# Altium footprint library WE-HCFT.PcbLib: 57 footprints (part 4 of 4)
Each footprint in its own frame and in the unit in brackets; x right, y up, seen from the top. Pads: shape width x height; smd on the part's side, far side on the other; paste and mask are expansions set on the pad; w line width, h text height; cw(c..) or ccw(c..) is an arc to the next point about the centre after c.
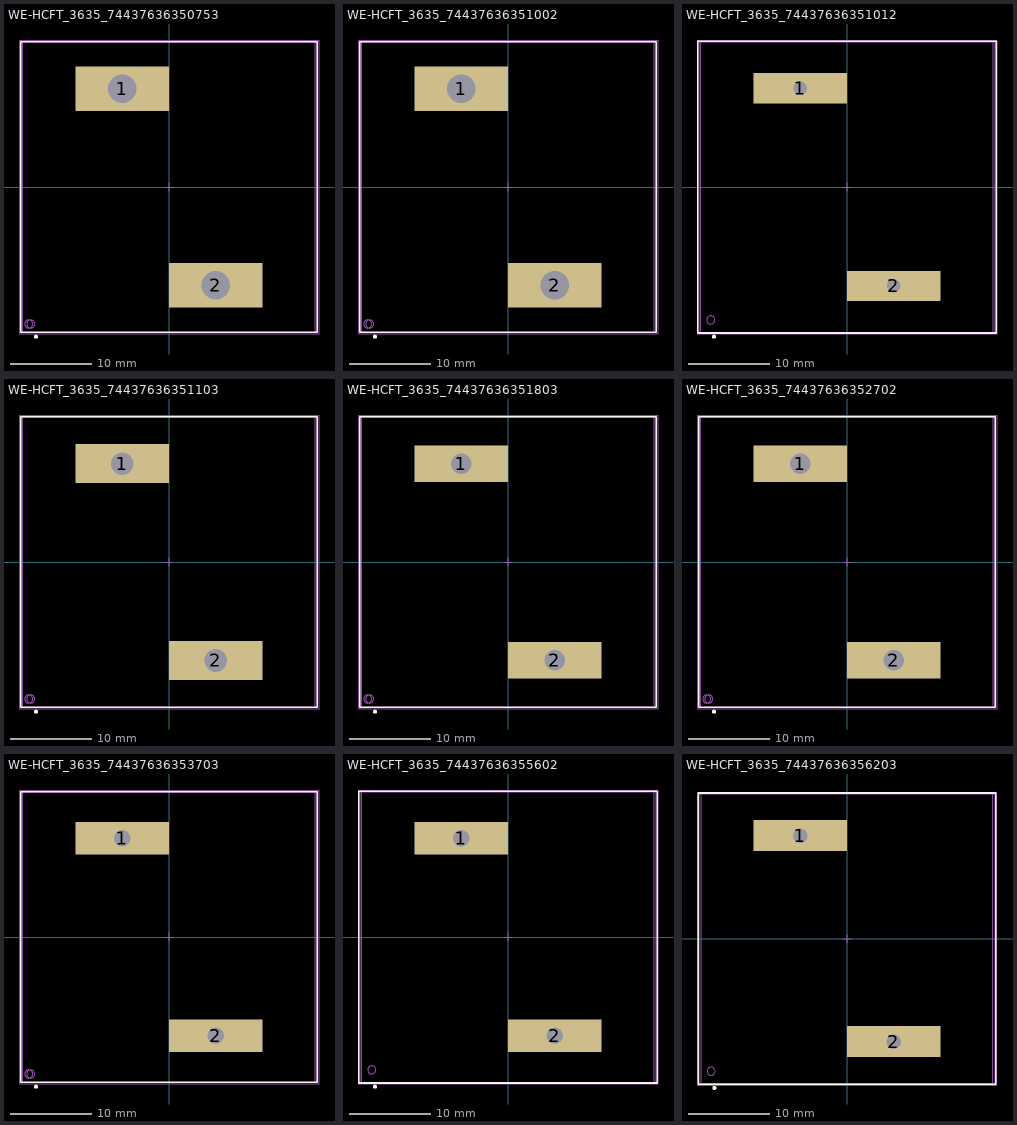
[diagram p3: the footprints below, top view; thin cyan lines are the x and y axes]

## WE-HCFT_3635_74437636350753 [mm] "THT High Current Inductor, body 36.00 x 35.70 mm"
height 34.2
pads (2):
  rect 11.5x5.5 hole 3.5 square: 1(-5.75,12.1) 2(5.75,-12.1)
Top Overlay:
  circle w0.25: c-16.364,-18.413 r0.125
  lines w0.2: -18.25,-17.85 18.25,-17.85 18.25,17.85 -18.25,17.85 -18.25,-17.85
Top Assembly:
  circle w0.1: c-17.25,-16.85 r0.5
  lines w0.1: -18.25,-17.85 18.25,-17.85 18.25,17.85 -18.25,17.85 -18.25,-17.85
Top Designator:
  text ".Designator" at -3.647,-0.357 h1
Top 3D Body:
  circle w0.1: c-17,-16.85 r0.5
  lines w0.1: -18,-17.85 -18,17.85 18,17.85 18,-17.85 -18,-17.85
Top Courtyard:
  lines w0.05: -18.45,-18.05 -18.45,18.05 18.45,18.05 18.45,-18.05 -18.45,-18.05
Top Component Center:
  lines w0.1: -0.5,0 0.5,0 ; 0,-0.5 0,0.5
3D body "74437636350753.stp": height 33.25, standoff -3.95, extent -18,-17.6 18,17.6

## WE-HCFT_3635_74437636351002 [mm] "THT High Current Inductor, body 36.00 x 35.70 mm"
height 34.2
pads (2):
  rect 11.5x5.5 hole 3.5 square: 1(-5.75,12.1) 2(5.75,-12.1)
Top Overlay:
  circle w0.25: c-16.364,-18.413 r0.125
  lines w0.2: -18.25,-17.85 18.25,-17.85 18.25,17.85 -18.25,17.85 -18.25,-17.85
Top Assembly:
  circle w0.1: c-17.25,-16.85 r0.5
  lines w0.1: -18.25,-17.85 18.25,-17.85 18.25,17.85 -18.25,17.85 -18.25,-17.85
Top Designator:
  text ".Designator" at -3.647,-0.357 h1
Top 3D Body:
  circle w0.1: c-17,-16.85 r0.5
  lines w0.1: -18,-17.85 -18,17.85 18,17.85 18,-17.85 -18,-17.85
Top Courtyard:
  lines w0.05: -18.45,-18.05 -18.45,18.05 18.45,18.05 18.45,-18.05 -18.45,-18.05
Top Component Center:
  lines w0.1: -0.5,0 0.5,0 ; 0,-0.5 0,0.5
3D body "74437636351002.stp": height 33.25, standoff -3.95, extent -18,-17.6 18,17.6

## WE-HCFT_3635_74437636351012 [mm] "THT High Current Inductor, body 36.00 x 35.70 mm"
height 34.2
pads (2):
  rect 11.5x3.7 hole 1.7 square: 1(-5.75,12.15) 2(5.75,-12.15)
Top Overlay:
  circle w0.25: c-16.364,-18.413 r0.125
  lines w0.2: -18.35,-17.95 18.35,-17.95 18.35,17.95 -18.35,17.95 -18.35,-17.95
Top Assembly:
  circle w0.1: c-16.75,-16.35 r0.5
  lines w0.1: -18.25,-17.85 18.25,-17.85 18.25,17.85 -18.25,17.85 -18.25,-17.85
Top Designator:
  text ".Designator" at -3.647,-0.357 h1
Top 3D Body:
  lines w0.1: -18,-17.85 -18,17.85 18,17.85 18,-17.85 -18,-17.85
Top Courtyard:
  lines w0.05: -18.45,-18.05 -18.45,18.05 18.45,18.05 18.45,-18.05 -18.45,-18.05
Top Component Center:
  lines w0.1: -0.5,0 0.5,0 ; 0,-0.5 0,0.5
3D body "74437636351012.stp": height 33.25, standoff -3.95, extent -18,-17.6 18,17.6

## WE-HCFT_3635_74437636351103 [mm] "THT High Current Inductor, body 36.00 x 35.70 mm"
height 34.2
pads (2):
  rect 11.5x4.8 hole 2.8 square: 1(-5.75,12.1) 2(5.75,-12.1)
Top Overlay:
  circle w0.25: c-16.364,-18.413 r0.125
  lines w0.2: -18.25,-17.85 18.25,-17.85 18.25,17.85 -18.25,17.85 -18.25,-17.85
Top Assembly:
  circle w0.1: c-17.25,-16.85 r0.5
  lines w0.1: -18.25,-17.85 18.25,-17.85 18.25,17.85 -18.25,17.85 -18.25,-17.85
Top Designator:
  text ".Designator" at -3.647,-0.357 h1
Top 3D Body:
  circle w0.1: c-17,-16.85 r0.5
  lines w0.1: -18,-17.85 -18,17.85 18,17.85 18,-17.85 -18,-17.85
Top Courtyard:
  lines w0.05: -18.45,-18.05 -18.45,18.05 18.45,18.05 18.45,-18.05 -18.45,-18.05
Top Component Center:
  lines w0.1: -0.5,0 0.5,0 ; 0,-0.5 0,0.5
3D body "74437636351103.stp": height 33.25, standoff -3.95, extent -18,-17.6 18,17.6

## WE-HCFT_3635_74437636351803 [mm] "THT High Current Inductor, body 36.00 x 35.70 mm"
height 34.2
pads (2):
  rect 11.5x4.5 hole 2.5 square: 1(-5.75,12.1) 2(5.75,-12.1)
Top Overlay:
  circle w0.25: c-16.364,-18.413 r0.125
  lines w0.2: -18.25,-17.85 18.25,-17.85 18.25,17.85 -18.25,17.85 -18.25,-17.85
Top Assembly:
  circle w0.1: c-17.25,-16.85 r0.5
  lines w0.1: -18.25,-17.85 18.25,-17.85 18.25,17.85 -18.25,17.85 -18.25,-17.85
Top Designator:
  text ".Designator" at -3.647,-0.357 h1
Top 3D Body:
  circle w0.1: c-17,-16.85 r0.5
  lines w0.1: -18,-17.85 -18,17.85 18,17.85 18,-17.85 -18,-17.85
Top Courtyard:
  lines w0.05: -18.45,-18.05 -18.45,18.05 18.45,18.05 18.45,-18.05 -18.45,-18.05
Top Component Center:
  lines w0.1: -0.5,0 0.5,0 ; 0,-0.5 0,0.5
3D body "74437636351803.stp": height 33.25, standoff -3.95, extent -18,-17.6 18,17.6

## WE-HCFT_3635_74437636352702 [mm] "THT High Current Inductor, body 36.00 x 35.70 mm"
height 34.2
pads (2):
  rect 11.5x4.5 hole 2.5 square: 1(-5.75,12.1) 2(5.75,-12.1)
Top Overlay:
  circle w0.25: c-16.364,-18.413 r0.125
  lines w0.2: -18.25,-17.85 18.25,-17.85 18.25,17.85 -18.25,17.85 -18.25,-17.85
Top Assembly:
  circle w0.1: c-17.25,-16.85 r0.5
  lines w0.1: -18.25,-17.85 18.25,-17.85 18.25,17.85 -18.25,17.85 -18.25,-17.85
Top Designator:
  text ".Designator" at -3.647,-0.357 h1
Top 3D Body:
  circle w0.1: c-17,-16.85 r0.5
  lines w0.1: -18,-17.85 -18,17.85 18,17.85 18,-17.85 -18,-17.85
Top Courtyard:
  lines w0.05: -18.45,-18.05 -18.45,18.05 18.45,18.05 18.45,-18.05 -18.45,-18.05
Top Component Center:
  lines w0.1: -0.5,0 0.5,0 ; 0,-0.5 0,0.5
3D body "74437636352702.stp": height 33.25, standoff -3.95, extent -18,-17.6 18,17.6

## WE-HCFT_3635_74437636353703 [mm] "THT High Current Inductor, body 36.00 x 35.70 mm"
height 34.2
pads (2):
  rect 11.5x4 hole 2 square: 1(-5.75,12.15) 2(5.75,-12.15)
Top Overlay:
  circle w0.25: c-16.364,-18.413 r0.125
  lines w0.2: -18.25,-17.85 18.25,-17.85 18.25,17.85 -18.25,17.85 -18.25,-17.85
Top Assembly:
  circle w0.1: c-17.25,-16.85 r0.5
  lines w0.1: -18.25,-17.85 18.25,-17.85 18.25,17.85 -18.25,17.85 -18.25,-17.85
Top Designator:
  text ".Designator" at -3.647,-0.357 h1
Top 3D Body:
  circle w0.1: c-17,-16.85 r0.5
  lines w0.1: -18,-17.85 -18,17.85 18,17.85 18,-17.85 -18,-17.85
Top Courtyard:
  lines w0.05: -18.45,-18.05 -18.45,18.05 18.45,18.05 18.45,-18.05 -18.45,-18.05
Top Component Center:
  lines w0.1: -0.5,0 0.5,0 ; 0,-0.5 0,0.5
3D body "74437636353703.stp": height 33.25, standoff -3.95, extent -18,-17.6 18,17.6

## WE-HCFT_3635_74437636355602 [mm] "THT High Current Inductor, body 36.00 x 35.70 mm"
height 34.2
pads (2):
  rect 11.5x4 hole 2 square: 1(-5.75,12.15) 2(5.75,-12.15)
Top Overlay:
  circle w0.25: c-16.364,-18.413 r0.125
  lines w0.2: -18.35,-17.95 18.35,-17.95 18.35,17.95 -18.35,17.95 -18.35,-17.95
Top Assembly:
  circle w0.1: c-16.75,-16.35 r0.5
  lines w0.1: -18.25,-17.85 18.25,-17.85 18.25,17.85 -18.25,17.85 -18.25,-17.85
Top Designator:
  text ".Designator" at -3.647,-0.357 h1
Top 3D Body:
  lines w0.1: -18,-17.85 18,-17.85 18,17.85 -18,17.85 -18,-17.85
Top Courtyard:
  lines w0.05: -18.45,-18.05 -18.45,18.05 18.45,18.05 18.45,-18.05 -18.45,-18.05
Top Component Center:
  lines w0.1: -0.5,0 0.5,0 ; 0,-0.5 0,0.5
3D body "74437636355602.stp": height 33.25, standoff -3.95, extent -18,-17.6 18,17.6

## WE-HCFT_3635_74437636356203 [mm] "THT High Current Inductor, body 36.00 x 35.70 mm"
height 34.2
pads (2):
  rect 11.5x3.8 hole 1.8 square: 1(-5.75,12.7) 2(5.75,-12.7)
Top Overlay:
  circle w0.25: c-16.364,-18.413 r0.125
  lines w0.2: -18.35,-17.95 18.35,-17.95 18.35,17.95 -18.35,17.95 -18.35,-17.95
Top Assembly:
  circle w0.1: c-16.75,-16.35 r0.5
  lines w0.1: -18.25,-17.85 18.25,-17.85 18.25,17.85 -18.25,17.85 -18.25,-17.85
Top Designator:
  text ".Designator" at -3.647,-0.357 h1
Top 3D Body:
  lines w0.1: -18,-17.85 18,-17.85 18,17.85 -18,17.85 -18,-17.85
Top Courtyard:
  lines w0.05: -18.45,-18.05 -18.45,18.05 18.45,18.05 18.45,-18.05 -18.45,-18.05
Top Component Center:
  lines w0.1: -0.5,0 0.5,0 ; 0,-0.5 0,0.5
3D body "74437636356203.stp": height 33.25, standoff -3.95, extent -18,-17.6 18,17.6